# Altium schematic symbol library Schlib1.SchLib: 18 symbols
Pins are listed as number, name and electrical type; pins without a type are passive.

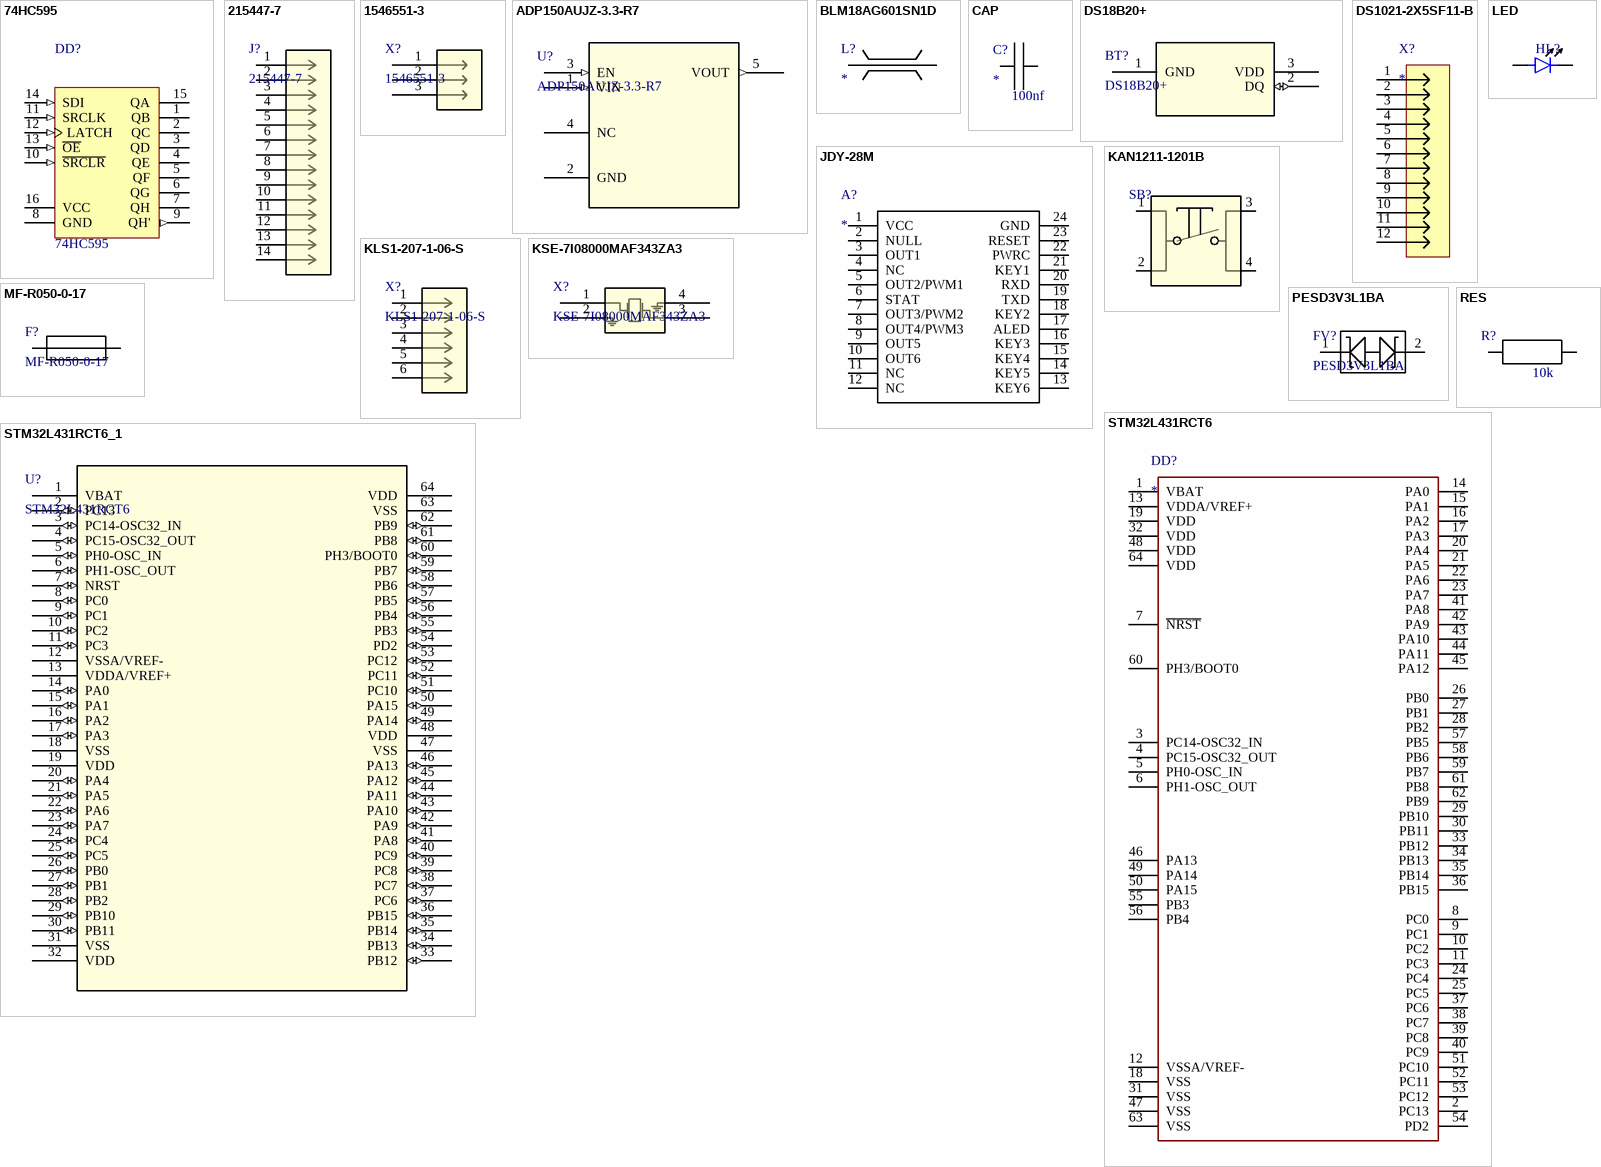
[diagram p0: symbols 74HC595 to STM32L431RCT6_1]

## 74HC595
designator DD?
8-Bit Shift Register with 3-State Output Registers; OriginalSource: AltTab; Order: *
footprint SO-16
pins: 1 QB (hiz), 2 QC (hiz), 3 QD (hiz), 4 QE (hiz), 5 QF (hiz), 6 QG (hiz), 7 QH (hiz), 8 GND (power), 9 QH' (out), 10 ~{SRCLR} (in), 11 SRCLK (in), 12 LATCH (in), 13 ~{OE} (in), 14 SDI (in), 15 QA (hiz), 16 VCC (power)

## 215447-7
designator J?
2x7 POS AMPMODU MOD II HDR ACTION PIN; Manufacturer_Name: TE Connectivity; Copyright: Copyright (C) 2025 Ultra Librarian. All rights reserved.; Manufacturer_Part_Number: 215447-7; RefDes: RefDes; Type: Type
footprint CONN_215447-7_TEC
pins: 1, 2, 3, 4, 5, 6, 7, 8, 9, 10, 11, 12, 13, 14

## 1546551-3
designator X?
3P,STRAIGHT,SIDE ENTRY,3.5MM; Manufacturer_Name: TE Connectivity; Copyright: Copyright (C) 2026 Ultra Librarian. All rights reserved.; Manufacturer_Part_Number: 1546551-3; RefDes: RefDes; Type: Type
footprint CONN3_1546551-3_TEC
footprint CONN3_1546551-3_TEC
pins: 1, 2, 3

## ADP150AUJZ-3.3-R7
designator U?
Ultralow Noise, 150 mA CMOS Linear Regulator; Manufacturer_Name: Analog Devices Inc; Copyright: Copyright (C) 2025 Ultra Librarian. All rights reserved.; Manufacturer_Part_Number: ADP150AUJZ-3.3-R7; RefDes: RefDes; Type: Type
footprint SOT95P280X100-5N (SOT23, 5-Leads, Body 2,90x2,80mm, Pitch 0,95mm, IPC Medium Density)
pins: 1 VIN (in), 2 GND (power), 3 EN (in), 4 NC, 5 VOUT (out)

## BLM18AG601SN1D
designator L?
footprint FILTER_BLM18AG_MUR
pins: 1, 2

## CAP
designator C?  value 100nf
footprint RES-0603N (Chip Resistor, 2-Leads, Body 1,60x0,85mm, IPC Medium Density)
pins: 1, 2

## DS18B20+
designator BT?
Programmable Resolution 1-Wire Digital Thermometer; Manufacturer_Name: Analog Devices Inc; Copyright: Copyright (C) 2025 Ultra Librarian. All rights reserved.; Manufacturer_Part_Number: DS18B20+; RefDes: RefDes; Type: Type
footprint 21-0248A_Q3-1_MXM
pins: 1 GND (power), 2 DQ (io), 3 VDD (power)

## DS1021-2X5SF11-B
designator X?
10 positions 2.54mm dual row vertical pin header through hole; MF: Connfly; MP: DS1021-2X5SF11-B; SnapEDA_Link: https://www.snapeda.com/parts/DS1021-2X5SF11-B/Connfly/view-part/?ref=snap; Package: None; Value: *; Check_prices: https://www.snapeda.com/parts/DS1021-2X5SF11-B/Connfly/view-part/?ref=eda
footprint CONNFLY_DS1021-2X5SF11-B
footprint CONNFLY_DS1021-2X5SF11-B
pins: 1, 2, 3, 4, 5, 6, 7, 8, 9, 10, 11, 12

## JDY-28M
designator A?
footprint QFN150P1495X1599X200_HS-33N (QFN, 32-Leads, Body 14,95x15,99mm, Pitch 1,50mm, Thermal Pad 11,30x11,30mm, IPC Medium Density)
pins: 1 VCC, 2 NULL, 3 OUT1, 4 NC, 5 OUT2/PWM1, 6 STAT, 7 OUT3/PWM2, 8 OUT4/PWM3, 9 OUT5, 10 OUT6, 11 NC, 12 NC, 13 KEY6, 14 KEY5, 15 KEY4, 16 KEY3, 17 ALED, 18 KEY2, 19 TXD, 20 RXD, 21 KEY1, 22 PWRC, 23 RESET, 24 GND

## KAN1211-1201B
designator SB?
KAN1211-1201B; Manufacturer_Name: C&K Components; Manufacturer_Part_Number: PTS125SM432LFS; Copyright: Copyright (C) 2025 Ultra Librarian. All rights reserved.
footprint SW4_PTS125SM432LFS_CNK
pins: 1, 2, 3, 4

## KLS1-207-1-06-S
designator X?
KLS1-207-1-06-S, Вилка штыревая 2.54мм 1x6 угловая; Manufacturer_Name: Oupiin; Manufacturer_Part_Number: 2011-1X06G00SB; Copyright: Copyright (C) 2025 Ultra Librarian. All rights reserved.; RefDes: RefDes; Type: Type
footprint CONN_2011-1X06G00SB_06P_OUP
footprint CONN_2011-1X06G00SB_06P_OUP
pins: 1, 2, 3, 4, 5, 6

## KSE-7I08000MAF343ZA3
designator X?
Description; Manufacturer_Name: Aker; Manufacturer_Part_Number: C5S-8.000-18-3030-X-R; Copyright: Copyright (C) 2025 Ultra Librarian. All rights reserved.; RefDes: RefDes; Type: Type
footprint C5S_5x3p2_SMD_AKR
footprint C5S_5x3p2_SMD_AKR
pins: 1 XTAL, 2 GND (power), 3 XTAL, 4 GND (power)

## LED
designator HL?  (value not drawn)
Light Emittering Diode; PartValue: LED*0603 *; OriginalSource: AltTab; Order: *; Package: *0603; Wavelength: *; LCSC Part #: *
footprint LED-0805N (Chip Resistor, 2-Leads, Body 2,10x1,30mm, IPC Medium Density)
footprint LED-1206N
pins: 1 Anode, 2 Cathode

## MF-R050-0-17
designator F?
Description; Manufacturer_Name: Bourns Electronics; Copyright: Copyright (C) 2025 Ultra Librarian. All rights reserved.; Manufacturer_Part_Number: MF-R050-0-17
footprint FUSE_MF-R050-0-17_BRN
footprint FUSE_MF-R050-0-17_BRN
pins: 1, 2

## PESD3V3L1BA
designator FV?
Description; Manufacturer_Name: Nexperia; Copyright: Copyright (C) 2025 Ultra Librarian. All rights reserved.; Manufacturer_Part_Number: PESD3V3L1BA
footprint SOD323_NEX
pins: 1, 2

## RES
designator R?  value 10k
footprint RES-0603N (Chip Resistor, 2-Leads, Body 1,60x0,85mm, IPC Medium Density)
pins: 1, 2

## STM32L431RCT6
designator DD?
footprint LQFP-64
pins: 1 VBAT, 2 PC13, 3 PC14-OSC32_IN, 4 PC15-OSC32_OUT, 5 PH0-OSC_IN, 6 PH1-OSC_OUT, 7 ~{NRST}, 8 PC0, 9 PC1, 10 PC2, 11 PC3, 12 VSSA/VREF-, 13 VDDA/VREF+, 14 PA0, 15 PA1, 16 PA2, 17 PA3, 18 VSS, 19 VDD, 20 PA4, 21 PA5, 22 PA6, 23 PA7, 24 PC4, 25 PC5, 26 PB0, 27 PB1, 28 PB2, 29 PB10, 30 PB11, 31 VSS, 32 VDD, 33 PB12, 34 PB13, 35 PB14, 36 PB15, 37 PC6, 38 PC7, 39 PC8, 40 PC9, 41 PA8, 42 PA9, 43 PA10, 44 PA11, 45 PA12, 46 PA13, 47 VSS, 48 VDD, 49 PA14, 50 PA15, 51 PC10, 52 PC11, 53 PC12, 54 PD2, 55 PB3, 56 PB4, 57 PB5, 58 PB6, 59 PB7, 60 PH3/BOOT0, 61 PB8, 62 PB9, 63 VSS, 64 VDD

## STM32L431RCT6_1
designator U?, comment STM32L431RCT6
Ultra-low-power with FPU Arm Cortex-M4 MCU 80 MHz with 256 Kbytes of Flash memory; Manufacturer_Name: STMicroelectronics; Copyright: Copyright (C) 2025 Ultra Librarian. All rights reserved.; Manufacturer_Part_Number: STM32L431RCT6; RefDes: RefDes; Type: Type
footprint LQFP-64
pins: 1 VBAT (power), 2 PC13 (io), 3 PC14-OSC32_IN (io), 4 PC15-OSC32_OUT (io), 5 PH0-OSC_IN (io), 6 PH1-OSC_OUT (io), 7 NRST (io), 8 PC0 (io), 9 PC1 (io), 10 PC2 (io), 11 PC3 (io), 12 VSSA/VREF- (power), 13 VDDA/VREF+ (power), 14 PA0 (io), 15 PA1 (io), 16 PA2 (io), 17 PA3 (io), 18 VSS (power), 19 VDD (power), 20 PA4 (io), 21 PA5 (io), 22 PA6 (io), 23 PA7 (io), 24 PC4 (io), 25 PC5 (io), 26 PB0 (io), 27 PB1 (io), 28 PB2 (io), 29 PB10 (io), 30 PB11 (io), 31 VSS (power), 32 VDD (power), 33 PB12 (io), 34 PB13 (io), 35 PB14 (io), 36 PB15 (io), 37 PC6 (io), 38 PC7 (io), 39 PC8 (io), 40 PC9 (io), 41 PA8 (io), 42 PA9 (io), 43 PA10 (io), 44 PA11 (io), 45 PA12 (io), 46 PA13 (io), 47 VSS (power), 48 VDD (power), 49 PA14 (io), 50 PA15 (io), 51 PC10 (io), 52 PC11 (io), 53 PC12 (io), 54 PD2 (io), 55 PB3 (io), 56 PB4 (io), 57 PB5 (io), 58 PB6 (io), 59 PB7 (io), 60 PH3/BOOT0 (io), 61 PB8 (io), 62 PB9 (io), 63 VSS (power), 64 VDD (power)